# Altium schematic symbol library DMN6075SQ-7.SchLib: 1 symbol
Pins are listed as number, name and electrical type; pins without a type are passive.

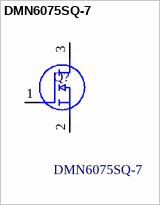
[diagram p0: symbol DMN6075SQ-7]

## DMN6075SQ-7
designator Q?
MOSFET MOSFET BVDSS: 41V 60V SOT23 T&R 3K; Manufacturer_Name: Diodes Incorporated; Geometry.Height: 1.1mm; Manufacturer_Part_Number: DMN6075SQ-7; Mouser Part Number: 621-DMN6075SQ-7; Mouser Price/Stock: https://www.mouser.co.uk/ProductDetail/Diodes-Incorporated/DMN6075SQ-7?qs=OTrKUuiFdkZBTPnT%2F2GqPA%3D%3D; Arrow Part Number: DMN6075SQ-7; Arrow Price/Stock: https://www.arrow.com/en/products/dmn6075sq-7/diodes-incorporated?utm_currency=USD&region=nac; Datasheet Link: https://www.diodes.com//assets/Datasheets/DMN6075SQ.pdf
footprint SOT96P240X110-3N
pins: 1 G, 2 S, 3 D